# Altium footprint library CoilcraftPCB.PcbLib: 320 footprints (part 13 of 20)
Each footprint in its own frame and in the unit in brackets; x right, y up, seen from the top. Pads: shape width x height; smd on the part's side, far side on the other; paste and mask are expansions set on the pad; w line width, h text height; cw(c..) or ccw(c..) is an arc to the next point about the centre after c.
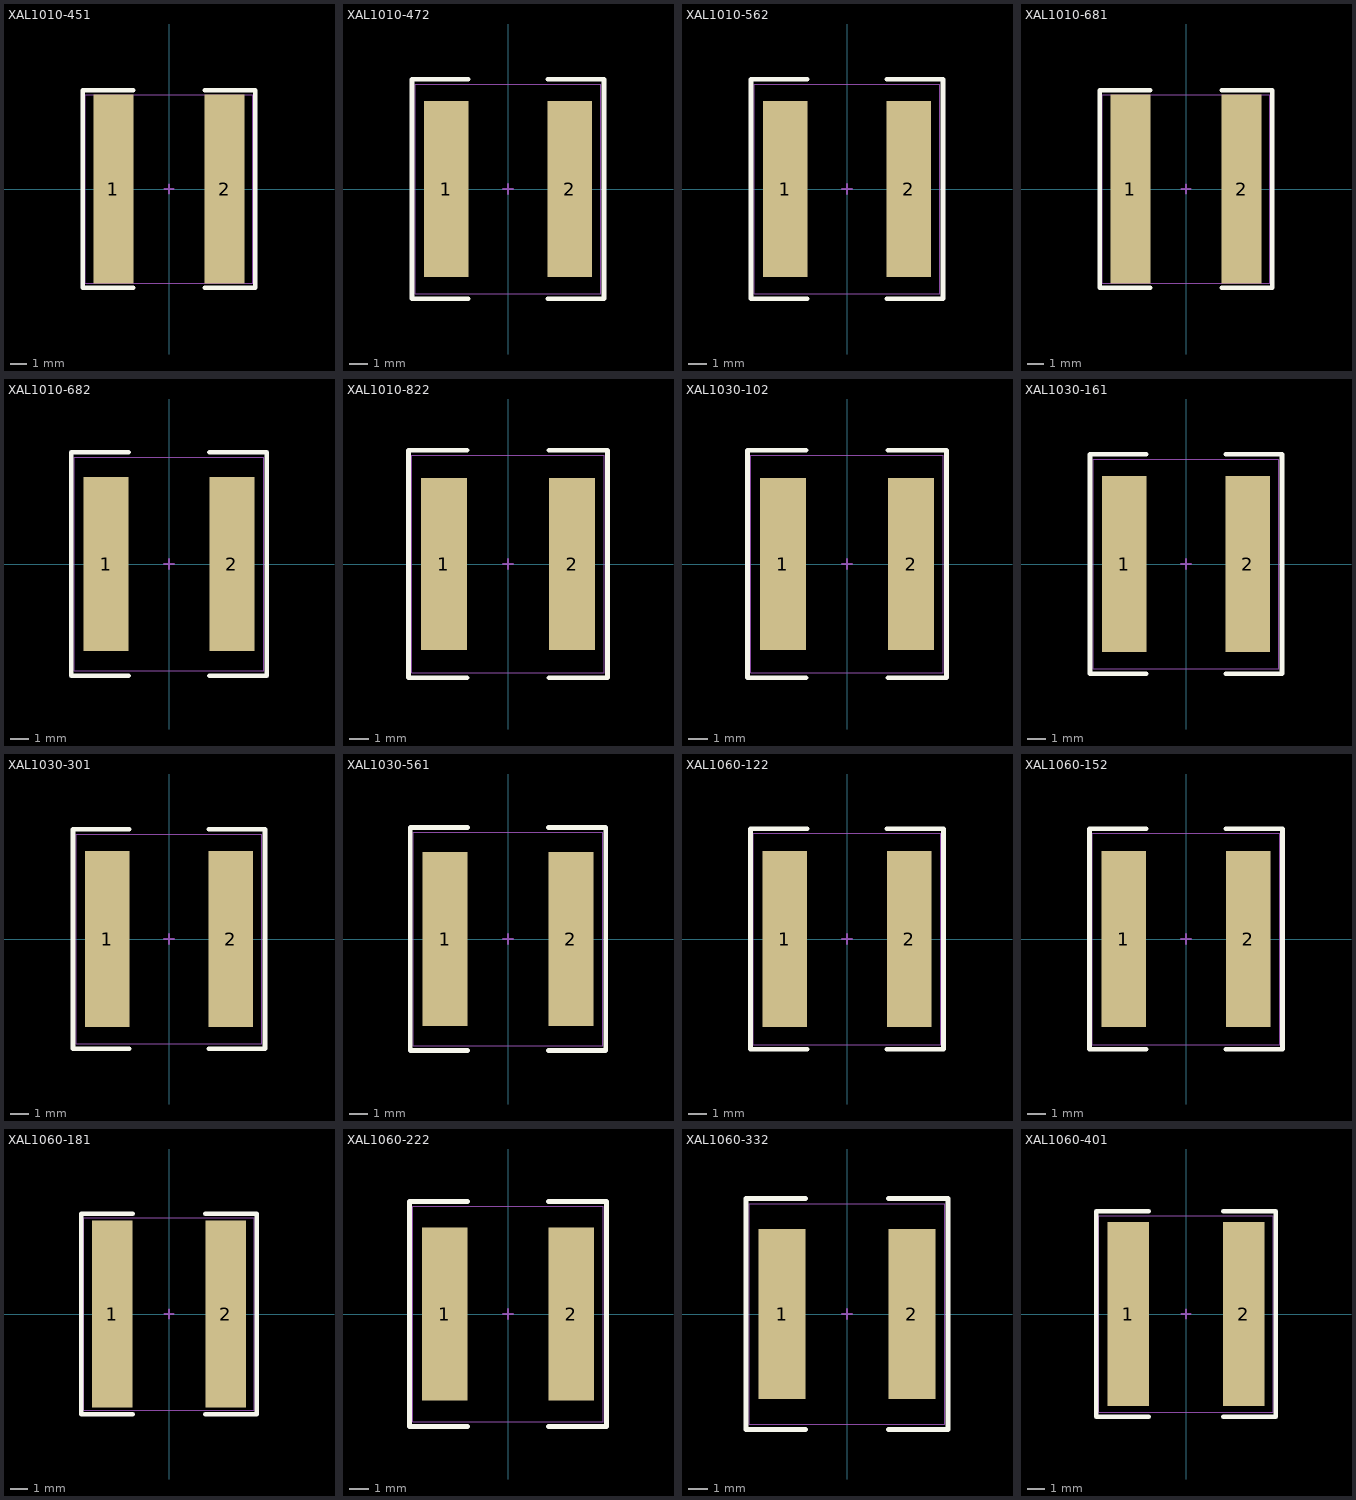
[diagram p12: the footprints below, top view; thin cyan lines are the x and y axes]

## XAL1010-451 [mil] "Coilcraft High Temperature Shielded Power Inductors"
height 394
pads (2):
  rect 94x445 smd: 1(-131,0) 2(131,0)
Top Overlay:
  lines w10: -84,-232.5 -203.5,-232.5 -203.5,232.5 -84,232.5 ; 84,-232.5 203.5,-232.5 203.5,232.5 84,232.5
Mechanical 13:
  lines w5: -10,0 10,0 ; 0,-10 0,10
Mechanical 14:
  lines w1: -197,-222.5 197,-222.5 197,222.5 -197,222.5 -197,-222.5
3D body: height 393.76, standoff 0.06, extent -206.69,-232.28 206.7,232.29

## XAL1010-472 [mil] "Coilcraft High Temperature Shielded Power Inductors"
height 394
pads (2):
  rect 94x374 smd: 1(-131,0) 2(131,0)
Top Overlay:
  lines w10: -84,-232.5 -203.5,-232.5 -203.5,232.5 -84,232.5 ; 84,-232.5 203.5,-232.5 203.5,232.5 84,232.5
Mechanical 13:
  lines w5: -10,0 10,0 ; 0,-10 0,10
Mechanical 14:
  lines w1: -197,-222.5 -197,222.5 197,222.5 197,-222.5 -197,-222.5
3D body: height 393.76, standoff 0.06, extent -206.7,-232.29 206.69,232.28

## XAL1010-562 [mil] "Coilcraft High Temperature Shielded Power Inductors"
height 394
pads (2):
  rect 94x374 smd: 1(-131,0) 2(131,0)
Top Overlay:
  lines w10: -84,-232.5 -203.5,-232.5 -203.5,232.5 -84,232.5 ; 84,-232.5 203.5,-232.5 203.5,232.5 84,232.5
Mechanical 13:
  lines w5: -10,0 10,0 ; 0,-10 0,10
Mechanical 14:
  lines w1: -197,-222.5 -197,222.5 197,222.5 197,-222.5 -197,-222.5
3D body: height 393.76, standoff 0.06, extent -206.7,-232.29 206.69,232.28

## XAL1010-681 [mil] "Coilcraft High Temperature Shielded Power Inductors"
height 394
pads (2):
  rect 94x445 smd: 1(-131,0) 2(131,0)
Top Overlay:
  lines w10: -84,-232.5 -203.5,-232.5 -203.5,232.5 -84,232.5 ; 84,-232.5 203.5,-232.5 203.5,232.5 84,232.5
Mechanical 13:
  lines w5: -10,0 10,0 ; 0,-10 0,10
Mechanical 14:
  lines w1: -197,-222.5 -197,222.5 197,222.5 197,-222.5 -197,-222.5
3D body: height 393.76, standoff 0.06, extent -206.7,-232.29 206.69,232.28

## XAL1010-682 [mil] "Coilcraft High Temperature Shielded Power Inductors"
height 394
pads (2):
  rect 94x362 smd: 1(-131,0) 2(131,0)
Top Overlay:
  lines w10: -84,-232.5 -203.5,-232.5 -203.5,232.5 -84,232.5 ; 84,-232.5 203.5,-232.5 203.5,232.5 84,232.5
Mechanical 13:
  lines w5: -10,0 10,0 ; 0,-10 0,10
Mechanical 14:
  lines w1: -197,-222.5 -197,222.5 197,222.5 197,-222.5 -197,-222.5
3D body: height 393.76, standoff 0.06, extent -206.7,-232.29 206.69,232.28

## XAL1010-822 [mil] "Coilcraft High Temperature Shielded Power Inductors"
height 394
pads (2):
  rect 94x351 smd: 1(-131,0) 2(131,0)
Top Overlay:
  lines w10: -84,-232.5 -203.5,-232.5 -203.5,232.5 -84,232.5 ; 84,-232.5 203.5,-232.5 203.5,232.5 84,232.5
Mechanical 13:
  lines w5: -10,0 10,0 ; 0,-10 0,10
Mechanical 14:
  lines w1: -197,-222.5 -197,222.5 197,222.5 197,-222.5 -197,-222.5
3D body: height 393.76, standoff 0.06, extent -206.7,-232.29 206.69,232.28

## XAL1030-102 [mil] "Coilcraft High Temperature Shielded Power Inductors"
height 122
pads (2):
  rect 94x351 smd: 1(-131,0) 2(131,0)
Top Overlay:
  lines w10: -84,-232.5 -203.5,-232.5 -203.5,232.5 -84,232.5 ; 84,-232.5 203.5,-232.5 203.5,232.5 84,232.5
Mechanical 13:
  lines w5: -10,0 10,0 ; 0,-10 0,10
Mechanical 14:
  lines w1: -197,-222.5 197,-222.5 197,222.5 -197,222.5 -197,-222.5
3D body: height 122.11, standoff 0.06, extent -206.69,-232.28 206.7,232.29

## XAL1030-161 [mil] "Coilcraft High Temperature Shielded Power Inductors"
height 122
pads (2):
  rect 94x374 smd: 1(-131,0) 2(131,0)
Top Overlay:
  lines w10: -84,-232.5 -203.5,-232.5 -203.5,232.5 -84,232.5 ; 84,-232.5 203.5,-232.5 203.5,232.5 84,232.5
Mechanical 13:
  lines w5: -10,0 10,0 ; 0,-10 0,10
Mechanical 14:
  lines w1: -197,-222.5 197,-222.5 197,222.5 -197,222.5 -197,-222.5
3D body: height 122.11, standoff 0.06, extent -206.69,-232.28 206.7,232.29

## XAL1030-301 [mil] "Coilcraft High Temperature Shielded Power Inductors"
height 122
pads (2):
  rect 94x374 smd: 1(-131,0) 2(131,0)
Top Overlay:
  lines w10: -84,-232.5 -203.5,-232.5 -203.5,232.5 -84,232.5 ; 84,-232.5 203.5,-232.5 203.5,232.5 84,232.5
Mechanical 13:
  lines w5: -10,0 10,0 ; 0,-10 0,10
Mechanical 14:
  lines w1: -197,-222.5 -197,222.5 197,222.5 197,-222.5 -197,-222.5
3D body: height 122.11, standoff 0.06, extent -206.69,-232.28 206.7,232.29

## XAL1030-561 [mil] "Coilcraft High Temperature Shielded Power Inductors"
height 122
pads (2):
  rect 94x363 smd: 1(-131,0) 2(131,0)
Top Overlay:
  lines w10: -84,-232.5 -203.5,-232.5 -203.5,232.5 -84,232.5 ; 84,-232.5 203.5,-232.5 203.5,232.5 84,232.5
Mechanical 13:
  lines w5: -10,0 10,0 ; 0,-10 0,10
Mechanical 14:
  lines w1: -197,-222.5 197,-222.5 197,222.5 -197,222.5 -197,-222.5
3D body: height 122.11, standoff 0.06, extent -206.69,-232.28 206.7,232.29

## XAL1060-122 [mil] "Coilcraft High Temperature Shielded Power Inductors"
height 236
pads (2):
  rect 94x370 smd: 1(-131,0) 2(131,0)
Top Overlay:
  lines w10: -84,-232.5 -203.5,-232.5 -203.5,232.5 -84,232.5 ; 84,-232.5 203.5,-232.5 203.5,232.5 84,232.5
Mechanical 13:
  lines w5: -10,0 10,0 ; 0,-10 0,10
Mechanical 14:
  lines w1: -197,-222.5 -197,222.5 197,222.5 197,-222.5 -197,-222.5
3D body: height 236.28, standoff 0.06, extent -206.69,-232.28 206.7,232.29

## XAL1060-152 [mil] "Coilcraft High Temperature Shielded Power Inductors"
height 236
pads (2):
  rect 94x370 smd: 1(-131,0) 2(131,0)
Top Overlay:
  lines w10: -84,-232.5 -203.5,-232.5 -203.5,232.5 -84,232.5 ; 84,-232.5 203.5,-232.5 203.5,232.5 84,232.5
Mechanical 13:
  lines w5: -10,0 10,0 ; 0,-10 0,10
Mechanical 14:
  lines w1: -197,-222.5 -197,222.5 197,222.5 197,-222.5 -197,-222.5
3D body: height 236.28, standoff 0.06, extent -206.69,-232.28 206.7,232.29

## XAL1060-181 [mil] "Coilcraft High Temperature Shielded Power Inductors"
height 236
pads (2):
  rect 94x433 smd: 1(-131,0) 2(131,0)
Top Overlay:
  lines w10: -84,-232.5 -203.5,-232.5 -203.5,232.5 -84,232.5 ; 84,-232.5 203.5,-232.5 203.5,232.5 84,232.5
Mechanical 13:
  lines w5: -10,0 10,0 ; 0,-10 0,10
Mechanical 14:
  lines w1: -197,-222.5 197,-222.5 197,222.5 -197,222.5 -197,-222.5
3D body: height 236.28, standoff 0.06, extent -206.69,-232.28 206.7,232.29

## XAL1060-222 [mil] "Coilcraft High Temperature Shielded Power Inductors"
height 236
pads (2):
  rect 94x358 smd: 1(-131,0) 2(131,0)
Top Overlay:
  lines w10: -84,-232.5 -203.5,-232.5 -203.5,232.5 -84,232.5 ; 84,-232.5 203.5,-232.5 203.5,232.5 84,232.5
Mechanical 13:
  lines w5: -10,0 10,0 ; 0,-10 0,10
Mechanical 14:
  lines w1: -197,-222.5 197,-222.5 197,222.5 -197,222.5 -197,-222.5
3D body: height 236.28, standoff 0.06, extent -206.69,-232.28 206.7,232.29

## XAL1060-332 [mil] "Coilcraft High Temperature Shielded Power Inductors"
height 236
pads (2):
  rect 94x343 smd: 1(-131,0) 2(131,0)
Top Overlay:
  lines w10: -84,-232.5 -203.5,-232.5 -203.5,232.5 -84,232.5 ; 84,-232.5 203.5,-232.5 203.5,232.5 84,232.5
Mechanical 13:
  lines w5: -10,0 10,0 ; 0,-10 0,10
Mechanical 14:
  lines w1: -197,-222.5 -197,222.5 197,222.5 197,-222.5 -197,-222.5
3D body: height 236.28, standoff 0.06, extent -206.69,-232.28 206.7,232.29

## XAL1060-401 [mil] "Coilcraft High Temperature Shielded Power Inductors"
height 236
pads (2):
  rect 94x417 smd: 1(-131,0) 2(131,0)
Top Overlay:
  lines w10: -84,-232.5 -203.5,-232.5 -203.5,232.5 -84,232.5 ; 84,-232.5 203.5,-232.5 203.5,232.5 84,232.5
Mechanical 13:
  lines w5: -10,0 10,0 ; 0,-10 0,10
Mechanical 14:
  lines w1: -197,-222.5 197,-222.5 197,222.5 -197,222.5 -197,-222.5
3D body: height 236.28, standoff 0.06, extent -206.69,-232.28 206.7,232.29